# Altium schematic symbol library PTPSM82913RDUR.SchLib: 1 symbol
Pins are listed as number, name and electrical type; pins without a type are passive.

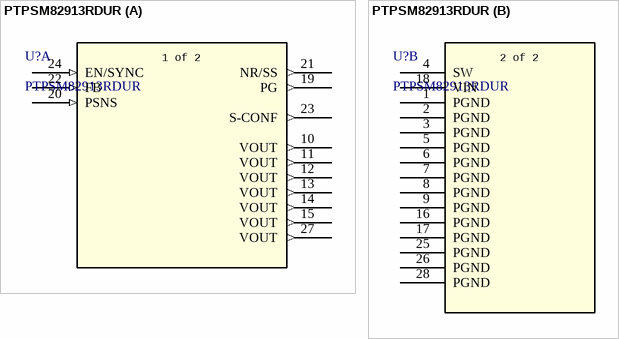
[diagram p0: symbol PTPSM82913RDUR]

## PTPSM82913RDUR
designator U?
17-V VIN, 3-A low-noise and low-ripple buck module with integrated ferrite bead filter compensation 28-B0QFN -40 to 125; Manufacturer_Name: Texas Instruments; Copyright: Copyright (C) 2026 Ultra Librarian. All rights reserved.; Manufacturer_Part_Number: PTPSM82913RDUR; RefDes: RefDes; Type: Type
footprint B0QFN28_RDU_TEX
part A pins: 10 VOUT (out), 11 VOUT (out), 12 VOUT (out), 13 VOUT (out), 14 VOUT (out), 15 VOUT (out), 19 PG (out), 20 PSNS (in), 21 NR/SS (out), 22 FB (in), 23 S-CONF (out), 24 EN/SYNC (in), 27 VOUT (out)
part B pins: 1 PGND (power), 2 PGND (power), 3 PGND (power), 4 SW, 5 PGND (power), 6 PGND (power), 7 PGND (power), 8 PGND (power), 9 PGND (power), 16 PGND (power), 17 PGND (power), 18 VIN (power), 25 PGND (power), 26 PGND (power), 28 PGND (power)
part A text: 1 of 2
part B text: 2 of 2